# Altium schematic symbol library SplitFlapDriverATtiny1616V4.kicad_pcb.SchLib: 12 symbols
Pins are listed as number, name and electrical type; pins without a type are passive.

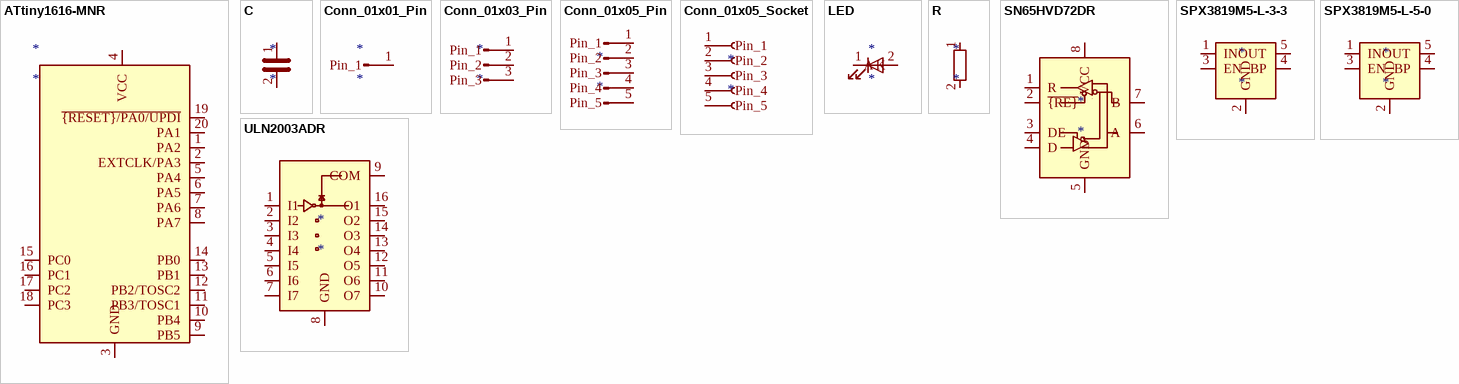
[diagram p0: symbols ATtiny1616-MNR to ULN2003ADR]

## ATtiny1616-MNR
designator *
pins: 1 PA2, 2 EXTCLK/PA3, 3 GND, 4 VCC, 5 PA4, 6 PA5, 7 PA6, 8 PA7, 9 PB5, 10 PB4, 11 PB3/TOSC1, 12 PB2/TOSC2, 13 PB1, 14 PB0, 15 PC0, 16 PC1, 17 PC2, 18 PC3, 19 ~{{RESET}/PA0/UPDI}, 20 PA1

## C
designator *
pins: 1, 2

## Conn_01x01_Pin
designator *
pins: 1 Pin_1

## Conn_01x03_Pin
designator *
pins: 1 Pin_1, 2 Pin_2, 3 Pin_3

## Conn_01x05_Pin
designator *
pins: 1 Pin_1, 2 Pin_2, 3 Pin_3, 4 Pin_4, 5 Pin_5

## Conn_01x05_Socket
designator *
pins: 1 Pin_1, 2 Pin_2, 3 Pin_3, 4 Pin_4, 5 Pin_5

## LED
designator *
pins: 1 K, 2 A

## R
designator *
pins: 1, 2

## SN65HVD72DR
designator *
pins: 1 R, 2 ~{{RE}}, 3 DE, 4 D, 5 GND, 6 A, 7 B, 8 VCC

## SPX3819M5-L-3-3
designator *
pins: 1 IN, 2 GND, 3 EN, 4 BP, 5 OUT

## SPX3819M5-L-5-0
designator *
pins: 1 IN, 2 GND, 3 EN, 4 BP, 5 OUT

## ULN2003ADR
designator *
pins: 1 I1, 2 I2, 3 I3, 4 I4, 5 I5, 6 I6, 7 I7, 8 GND, 9 COM, 10 O7, 11 O6, 12 O5, 13 O4, 14 O3, 15 O2, 16 O1